# Altium footprint library FootPrintLib_9.PcbLib: 287 footprints (part 13 of 18)
Each footprint in its own frame and in the unit in brackets; x right, y up, seen from the top. Pads: shape width x height; smd on the part's side, far side on the other; paste and mask are expansions set on the pad; w line width, h text height; cw(c..) or ccw(c..) is an arc to the next point about the centre after c.
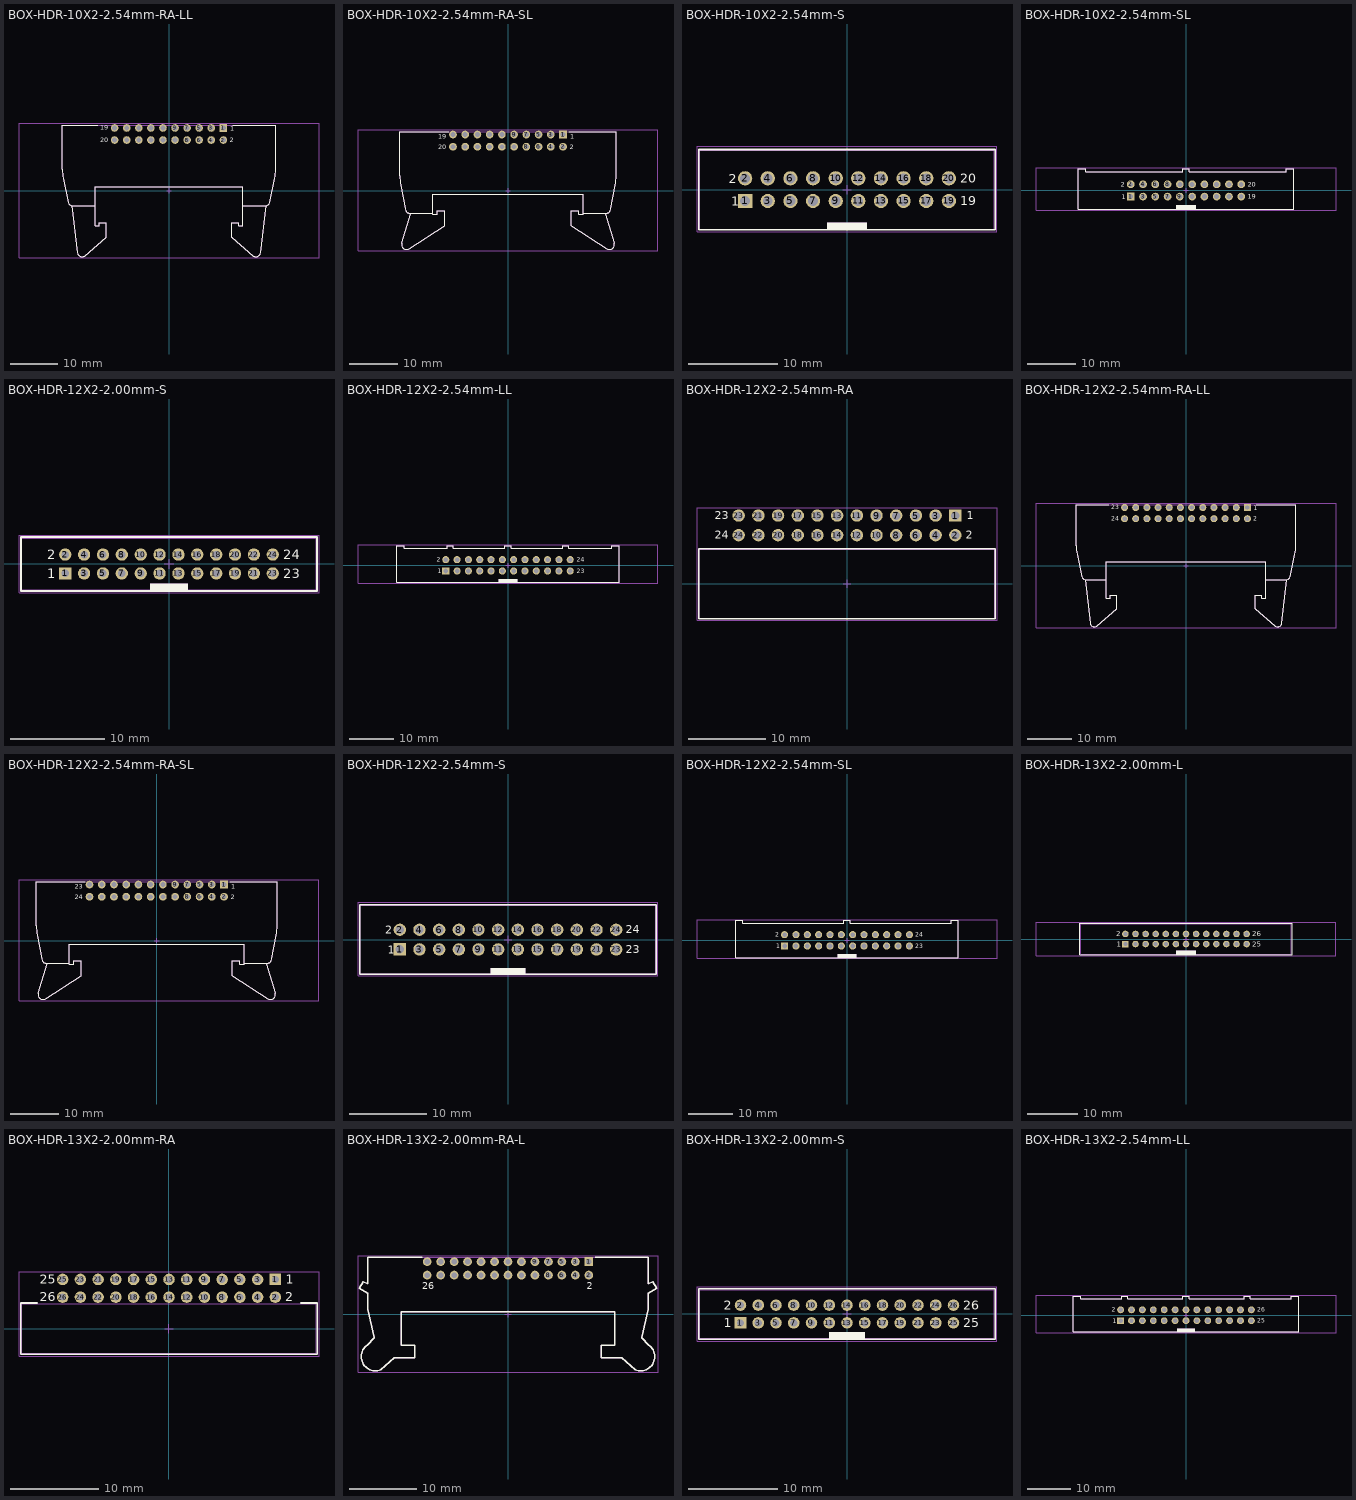
[diagram p12: the footprints below, top view; thin cyan lines are the x and y axes]

## BOX-HDR-10X2-2.54mm-RA-LL [mm] "20 pins, right angeled, long lever, gold plating"
height 10.8
pads (20):
  rect 1.6x1.6 hole 1.02: 1(11.43,13.23)
  round 1.6 hole 1.02: 2(11.43,10.69) 3(8.89,13.23) 4(8.89,10.69) 5(6.35,13.23) 6(6.35,10.69) 7(3.81,13.23) 8(3.81,10.69) 9(1.27,13.23) 10(1.27,10.69) 11(-1.27,13.23) 12(-1.27,10.69) 13(-3.81,13.23) 14(-3.81,10.69) 15(-6.35,13.23) 16(-6.35,10.69) 17(-8.89,13.23) 18(-8.89,10.69) 19(-11.43,13.23) 20(-11.43,10.69)
Top Overlay:
  lines w0.2: -22.45,4.54 -22.45,13.85 -15,13.85 ; -22.445,4.54 ccw(c-12.45,4.84) -22.204,2.636 -21.159,-2.534 ; -21.153,-2.533 ccw(c-20.23,-2.15) -20.23,-3.15 -15.55,-3.15 ; -20.414,-3.15 -19.268,-13.022 ccw(c-18.28,-12.87) -17.622,-13.623 -13.151,-9.758 ; -13.15,-9.76 -13.15,-6.66 -14.65,-6.66 -14.65,-7.37 -15.55,-7.37 -15.55,0.85 15.55,0.85 15.55,-7.37 14.65,-7.37 14.65,-6.66 13.15,-6.66 13.15,-9.76 ; 13.151,-9.758 17.623,-13.623 ccw(c18.28,-12.87) 19.268,-13.022 20.414,-3.15 ; 13.4,13.85 22.45,13.85 22.45,4.54 ; 15.55,-3.15 20.23,-3.15 ccw(c20.23,-2.15) 21.154,-2.533 ; 21.159,-2.534 22.204,2.636 ccw(c12.45,4.84) 22.446,4.54
  text "1" at 12.85,12.66 h1.02
  text "2" at 12.75,10.26 h1.02
  text "19" at -14.5,12.8 h1.02
  text "20" at -14.5,10.26 h1.02
Mechanical 13:
  lines w0.1: -22.45,4.54 -22.45,13.85 22.45,13.85 22.45,4.54 ; -22.445,4.54 ccw(c-12.45,4.84) -22.204,2.636 -21.159,-2.534 ; -21.153,-2.533 ccw(c-20.23,-2.15) -20.23,-3.15 -15.55,-3.15 ; -20.414,-3.15 -19.268,-13.022 ccw(c-18.28,-12.87) -17.622,-13.623 -13.151,-9.758 ; -13.15,-9.76 -13.15,-6.66 -14.65,-6.66 -14.65,-7.37 -15.55,-7.37 -15.55,0.85 15.55,0.85 15.55,-7.37 14.65,-7.37 14.65,-6.66 13.15,-6.66 13.15,-9.76 ; 13.151,-9.758 17.623,-13.623 ccw(c18.28,-12.87) 19.268,-13.022 20.414,-3.15 ; 15.55,-3.15 20.23,-3.15 ccw(c20.23,-2.15) 21.154,-2.533 ; 21.159,-2.534 22.204,2.636 ccw(c12.45,4.84) 22.446,4.54
Mechanical 15:
  lines w0.05: -0.5,0 0.5,0 ; 0,-0.5 0,0.5 ; -31.55,-14.06 -31.55,14.23 31.55,14.23 31.55,-14.06 -31.55,-14.06
3D body "61202022921 (rev1).stp": height 8.35, standoff -2.35, extent -22.45,-13.871 22.45,13.85

## BOX-HDR-10X2-2.54mm-RA-SL [mm] "20 pins, right angeled, short lever, gold plating"
height 8.3
pads (20):
  rect 1.6x1.6 hole 1.02: 1(11.43,11.63)
  round 1.6 hole 1.02: 2(11.43,9.09) 3(8.89,11.63) 4(8.89,9.09) 5(6.35,11.63) 6(6.35,9.09) 7(3.81,11.63) 8(3.81,9.09) 9(1.27,11.63) 10(1.27,9.09) 11(-1.27,11.63) 12(-1.27,9.09) 13(-3.81,11.63) 14(-3.81,9.09) 15(-6.35,11.63) 16(-6.35,9.09) 17(-8.89,11.63) 18(-8.89,9.09) 19(-11.43,11.63) 20(-11.43,9.09)
Top Overlay:
  lines w0.2: -21.314,-3.751 -22.256,1.138 cw(c-12.45,3.1) -22.45,3.1 -22.45,12.25 -12.35,12.25 ; -21.31,-3.75 ccw(c-20.31,-3.75) -20.31,-4.75 ; -20.405,-4.75 -15.65,-4.75 ; -20.224,-4.851 -22.057,-10.941 ccw(c-21.1,-11.23) -20.55,-12.066 -13.15,-7.33 -13.15,-4.23 -14.65,-4.23 -14.65,-4.94 -15.65,-4.94 -15.65,-0.75 15.65,-0.75 15.65,-4.94 14.65,-4.94 14.65,-4.23 13.15,-4.23 13.15,-7.33 20.55,-12.067 ccw(c21.1,-11.23) 22.057,-10.941 20.224,-4.851 ; 12.6,12.25 22.45,12.25 22.45,3.1 cw(c12.45,3.1) 22.256,1.138 21.314,-3.751 ; 15.65,-4.75 20.405,-4.75 ; 20.31,-4.75 ccw(c20.31,-3.75) 21.31,-3.75
  text "19" at -14.5,10.8 h1.02
  text "20" at -14.5,8.6 h1.02
  text "2" at 12.85,8.6 h1.02
  text "1" at 12.95,10.8 h1.02
Mechanical 13:
  lines w0.1: -21.314,-3.751 -22.256,1.138 cw(c-12.45,3.1) -22.45,3.1 -22.45,12.25 22.45,12.25 22.45,3.1 cw(c12.45,3.1) 22.256,1.138 21.314,-3.751 ; -21.31,-3.75 ccw(c-20.31,-3.75) -20.31,-4.75 ; -20.405,-4.75 -15.65,-4.75 ; -20.224,-4.851 -22.057,-10.941 ccw(c-21.1,-11.23) -20.55,-12.066 -13.15,-7.33 -13.15,-4.23 -14.65,-4.23 -14.65,-4.94 -15.65,-4.94 -15.65,-0.75 15.65,-0.75 15.65,-4.94 14.65,-4.94 14.65,-4.23 13.15,-4.23 13.15,-7.33 20.55,-12.067 ccw(c21.1,-11.23) 22.057,-10.941 20.224,-4.851 ; 15.65,-4.75 20.405,-4.75 ; 20.31,-4.75 ccw(c20.31,-3.75) 21.31,-3.75
Mechanical 15:
  lines w0.05: -0.5,0 0.5,0 ; 0,-0.5 0,0.5 ; -31.15,-12.45 31.15,-12.45 31.15,12.63 -31.15,12.63 -31.15,-12.45
3D body "61202022121.stp": height 8.35, standoff -3.35, extent -22.45,-12.25 22.45,12.25

## BOX-HDR-10X2-2.54mm-S [mm] "20 pins, straight, gold plating"
height 9.1
pads (20):
  rect 1.6x1.6 hole 1.1: 1(-11.43,-1.27)
  round 1.6 hole 1.1: 2(-11.43,1.27) 3(-8.89,-1.27) 4(-8.89,1.27) 5(-6.35,-1.27) 6(-6.35,1.27) 7(-3.81,-1.27) 8(-3.81,1.27) 9(-1.27,-1.27) 10(-1.27,1.27) 11(1.27,-1.27) 12(1.27,1.27) 13(3.81,-1.27) 14(3.81,1.27) 15(6.35,-1.27) 16(6.35,1.27) 17(8.89,-1.27) 18(8.89,1.27) 19(11.43,-1.27) 20(11.43,1.27)
Top Overlay:
  rectangle: -2.25,-4.5 2.25,-3.7
  lines w0.2: -16.63,-4.5 16.63,-4.5 16.63,4.5 -16.63,4.5 -16.63,-4.5
  text "19" at 12.69,-1.74 h1.02
  text "20" at 12.69,0.8 h1.02
  text "1" at -12.99,-1.8 h1.02
  text "2" at -13.29,0.74 h1.02
Mechanical 13:
  rectangle: -2.25,-4.425 2.25,-3.7
  lines w0.1: -16.53,-4.425 -16.53,4.425 16.53,4.425 16.53,-4.425 -16.53,-4.425
Mechanical 15:
  lines w0.05: -0.5,0 0.5,0 ; 0,-0.5 0,0.5 ; -16.83,-4.7 16.83,-4.7 16.83,4.85 -16.83,4.85 -16.83,-4.7
3D body "61202021621.stp": height 9.13, standoff -2.98, extent -16.53,-4.425 16.53,4.75

## BOX-HDR-10X2-2.54mm-SL [mm] "20 pins, straight, short lever, gold plating"
height 24.5
pads (20):
  rect 1.6x1.6 hole 1.02: 1(-11.43,-1.27)
  round 1.6 hole 1.02: 2(-11.43,1.27) 3(-8.89,-1.27) 4(-8.89,1.27) 5(-6.35,-1.27) 6(-6.35,1.27) 7(-3.81,-1.27) 8(-3.81,1.27) 9(-1.27,-1.27) 10(-1.27,1.27) 11(1.27,-1.27) 12(1.27,1.27) 13(3.81,-1.27) 14(3.81,1.27) 15(6.35,-1.27) 16(6.35,1.27) 17(8.89,-1.27) 18(8.89,1.27) 19(11.43,-1.27) 20(11.43,1.27)
Top Overlay:
  rectangle: -2.1,-3.85 2.1,-3.05
  lines w0.2: -0.7,4.45 0.7,4.45 0.7,3.85 20.8,3.85 20.8,4.45 22.35,4.45 22.35,-3.85 -22.35,-3.85 -22.35,4.45 -20.8,4.45 -20.8,3.85 -0.7,3.85 -0.7,4.45 ; -0.7,4.45 -0.7,4.45
  text "19" at 12.75,-1.74 h1.02
  text "20" at 12.75,0.8 h1.02
  text "2" at -13.55,0.8 h1.02
  text "1" at -13.25,-1.8 h1.02
Mechanical 13:
  rectangle: -2.1,-3.85 2.1,-3.05
  lines w0.1: -0.7,4.45 -0.7,3.85 -20.8,3.85 -20.8,4.45 -22.35,4.45 -22.35,-3.85 22.35,-3.85 22.35,4.45 20.8,4.45 20.8,3.85 0.7,3.85 0.7,4.45 -0.7,4.45 ; -0.7,4.45 -0.7,4.45
Mechanical 15:
  lines w0.05: -0.5,0 0.5,0 ; 0,-0.5 0,0.5 ; -31.05,-4.05 -31.05,4.65 31.05,4.65 31.05,-4.05 -31.05,-4.05
3D body "61202022021.stp": height 24.55, standoff -3.35, extent -22.449,-3.849 22.451,4.451

## BOX-HDR-12X2-2.00mm-S [mm] "2.00mm Male Box Header, 24p"
height 5.6
pads (24):
  rect 1.3x1.3 hole 0.8: 1(-11,-1)
  round 1.3 hole 0.8: 2(-11,1) 3(-9,-1) 4(-9,1) 5(-7,-1) 6(-7,1) 7(-5,-1) 8(-5,1) 9(-3,-1) 10(-3,1) 11(-1,-1) 12(-1,1) 13(1,-1) 14(1,1) 15(3,-1) 16(3,1) 17(5,-1) 18(5,1) 19(7,-1) 20(7,1) 21(9,-1) 22(9,1) 23(11,-1) 24(11,1)
Top Overlay:
  rectangle: -2,-2.85 2,-2.05
  lines w0.2: -15.7,-2.85 -15.7,2.85 15.7,2.85 15.7,-2.85 -15.7,-2.85
  text "23" at 12.1,-1.5 h1.02
  text "24" at 12.1,0.5 h1.02
  text "2" at -12.9,0.5 h1.02
  text "1" at -12.9,-1.5 h1.02
Mechanical 13:
  rectangle: -2,-2.75 2,-2.05
  lines w0.1: -15.6,-2.75 15.6,-2.75 15.6,2.75 -15.6,2.75 -15.6,-2.75
Mechanical 15:
  lines w0.05: -0.5,0 0.5,0 ; 0,-0.5 0,0.5 ; -15.9,-3.05 15.9,-3.05 15.9,3.05 -15.9,3.05 -15.9,-3.05
3D body "62502421621.stp": height 5.65, standoff -2.5, extent -15.6,-2.75 15.6,2.75

## BOX-HDR-12X2-2.54mm-LL [mm] "24 pins, straight, long lever, gold plating"
height 28
pads (24):
  rect 1.6x1.6 hole 1.02: 1(-13.97,-1.27)
  round 1.6 hole 1.02: 2(-13.97,1.27) 3(-11.43,-1.27) 4(-11.43,1.27) 5(-8.89,-1.27) 6(-8.89,1.27) 7(-6.35,-1.27) 8(-6.35,1.27) 9(-3.81,-1.27) 10(-3.81,1.27) 11(-1.27,-1.27) 12(-1.27,1.27) 13(1.27,-1.27) 14(1.27,1.27) 15(3.81,-1.27) 16(3.81,1.27) 17(6.35,-1.27) 18(6.35,1.27) 19(8.89,-1.27) 20(8.89,1.27) 21(11.43,-1.27) 22(11.43,1.27) 23(13.97,-1.27) 24(13.97,1.27)
Top Overlay:
  rectangle: -2.1,-3.85 2.1,-3.04
  lines w0.2: -24.99,-3.85 24.99,-3.85 24.99,4.45 23.26,4.45 23.26,3.85 13.69,3.85 13.69,4.45 12.29,4.45 12.29,3.85 0.7,3.85 0.7,4.45 -0.7,4.45 -0.7,3.85 -12.29,3.85 -12.29,4.45 -13.69,4.45 -13.69,3.85 -23.26,3.85 -23.26,4.45 -24.99,4.45 -24.99,-3.85
  text "24" at 15.39,0.8 h1.02
  text "23" at 15.39,-1.74 h1.02
  text "1" at -15.79,-1.8 h1.02
  text "2" at -15.99,0.8 h1.02
Mechanical 13:
  rectangle: -2.1,-3.85 2.1,-3.04
  lines w0.1: -24.99,-3.85 -24.99,4.45 -23.26,4.45 -23.26,3.85 -13.69,3.85 -13.69,4.45 -12.29,4.45 -12.29,3.85 -0.7,3.85 -0.7,4.45 0.7,4.45 0.7,3.85 12.29,3.85 12.29,4.45 13.69,4.45 13.69,3.85 23.26,3.85 23.26,4.45 24.99,4.45 24.99,-3.85 -24.99,-3.85
Mechanical 15:
  lines w0.05: -0.5,0 0.5,0 ; 0,-0.5 0,0.5 ; -33.69,-4.05 33.69,-4.05 33.69,4.65 -33.69,4.65 -33.69,-4.05
3D body "61202422821 (rev1).stp": height 27.84, standoff -3.35, extent -24.99,-3.86 24.99,4.45

## BOX-HDR-12X2-2.54mm-RA [mm] "24 pins, right angled, gold plating"
height 9.1
pads (24):
  rect 1.6x1.6 hole 1.1: 1(13.97,8.805)
  round 1.6 hole 1.1: 2(13.97,6.265) 3(11.43,8.805) 4(11.43,6.265) 5(8.89,8.805) 6(8.89,6.265) 7(6.35,8.805) 8(6.35,6.265) 9(3.81,8.805) 10(3.81,6.265) 11(1.27,8.805) 12(1.27,6.265) 13(-1.27,8.805) 14(-1.27,6.265) 15(-3.81,8.805) 16(-3.81,6.265) 17(-6.35,8.805) 18(-6.35,6.265) 19(-8.89,8.805) 20(-8.89,6.265) 21(-11.43,8.805) 22(-11.43,6.265) 23(-13.97,8.805) 24(-13.97,6.265)
Top Overlay:
  lines w0.2: -19.145,-4.5 -19.145,4.5 19.145,4.5 19.145,-4.5 -19.145,-4.5
  text "2" at 15.33,5.8 h1.02
  text "1" at 15.43,8.34 h1.02
  text "24" at -17.04,5.8 h1.02
  text "23" at -17.04,8.34 h1.02
Mechanical 13:
  lines w0.1: -19.07,-4.425 -19.07,4.425 19.07,4.425 19.07,-4.425 -19.07,-4.425
Mechanical 15:
  lines w0.05: -0.5,0 0.5,0 ; 0,-0.5 0,0.5 ; -19.345,-4.7 19.345,-4.7 19.345,9.805 -19.345,9.805 -19.345,-4.7
3D body "61202421721.stp": height 9.23, standoff -2.88, extent -19.07,-4.425 19.07,9.125

## BOX-HDR-12X2-2.54mm-RA-LL [mm] "24 pins, right angeled, long lever, gold plating"
height 10.8
pads (24):
  rect 1.6x1.6 hole 1.02: 1(13.97,13.23)
  round 1.6 hole 1.02: 2(13.97,10.69) 3(11.43,13.23) 4(11.43,10.69) 5(8.89,13.23) 6(8.89,10.69) 7(6.35,13.23) 8(6.35,10.69) 9(3.81,13.23) 10(3.81,10.69) 11(1.27,13.23) 12(1.27,10.69) 13(-1.27,13.23) 14(-1.27,10.69) 15(-3.81,13.23) 16(-3.81,10.69) 17(-6.35,13.23) 18(-6.35,10.69) 19(-8.89,13.23) 20(-8.89,10.69) 21(-11.43,13.23) 22(-11.43,10.69) 23(-13.97,13.23) 24(-13.97,10.69)
Top Overlay:
  lines w0.2: -24.99,4.54 -24.99,13.85 -17.54,13.85 ; -24.985,4.54 ccw(c-14.99,4.84) -24.744,2.636 -23.699,-2.534 ; -23.693,-2.533 ccw(c-22.77,-2.15) -22.77,-3.15 -18.09,-3.15 ; -22.954,-3.15 -21.808,-13.022 ccw(c-20.82,-12.87) -20.162,-13.623 -15.691,-9.758 ; -15.69,-9.76 -15.69,-6.66 -17.19,-6.66 -17.19,-7.37 -18.09,-7.37 -18.09,0.85 18.09,0.85 18.09,-7.37 17.19,-7.37 17.19,-6.66 15.69,-6.66 15.69,-9.76 ; 15.691,-9.758 20.163,-13.623 ccw(c20.82,-12.87) 21.808,-13.022 22.954,-3.15 ; 15.94,13.85 24.99,13.85 24.99,4.54 ; 18.09,-3.15 22.77,-3.15 ccw(c22.77,-2.15) 23.694,-2.533 ; 23.699,-2.534 24.744,2.636 ccw(c14.99,4.84) 24.986,4.54
  text "23" at -17.04,12.8 h1.02
  text "24" at -17.04,10.26 h1.02
  text "2" at 15.29,10.26 h1.02
  text "1" at 15.39,12.66 h1.02
Mechanical 13:
  lines w0.1: -24.99,4.54 -24.99,13.85 24.99,13.85 24.99,4.54 ; -24.985,4.54 ccw(c-14.99,4.84) -24.744,2.636 -23.699,-2.534 ; -23.693,-2.533 ccw(c-22.77,-2.15) -22.77,-3.15 -18.09,-3.15 ; -22.954,-3.15 -21.808,-13.022 ccw(c-20.82,-12.87) -20.162,-13.623 -15.691,-9.758 ; -15.69,-9.76 -15.69,-6.66 -17.19,-6.66 -17.19,-7.37 -18.09,-7.37 -18.09,0.85 18.09,0.85 18.09,-7.37 17.19,-7.37 17.19,-6.66 15.69,-6.66 15.69,-9.76 ; 15.691,-9.758 20.163,-13.623 ccw(c20.82,-12.87) 21.808,-13.022 22.954,-3.15 ; 18.09,-3.15 22.77,-3.15 ccw(c22.77,-2.15) 23.694,-2.533 ; 23.699,-2.534 24.744,2.636 ccw(c14.99,4.84) 24.986,4.54
Mechanical 15:
  lines w0.05: -0.5,0 0.5,0 ; 0,-0.5 0,0.5 ; -34.09,-14.06 34.09,-14.06 34.09,14.23 -34.09,14.23 -34.09,-14.06
3D body "61202422921 (rev1).stp": height 8.35, standoff -2.35, extent -24.99,-13.871 24.99,13.85

## BOX-HDR-12X2-2.54mm-RA-SL [mm] "24 pins, right angeled, short lever, gold plating"
height 8.3
pads (24):
  rect 1.6x1.6 hole 1.02: 1(13.97,11.63)
  round 1.6 hole 1.02: 2(13.97,9.09) 3(11.43,11.63) 4(11.43,9.09) 5(8.89,11.63) 6(8.89,9.09) 7(6.35,11.63) 8(6.35,9.09) 9(3.81,11.63) 10(3.81,9.09) 11(1.27,11.63) 12(1.27,9.09) 13(-1.27,11.63) 14(-1.27,9.09) 15(-3.81,11.63) 16(-3.81,9.09) 17(-6.35,11.63) 18(-6.35,9.09) 19(-8.89,11.63) 20(-8.89,9.09) 21(-11.43,11.63) 22(-11.43,9.09) 23(-13.97,11.63) 24(-13.97,9.09)
Top Overlay:
  lines w0.2: -23.854,-3.751 -24.796,1.138 cw(c-14.99,3.1) -24.99,3.1 -24.99,12.25 -14.89,12.25 ; -23.85,-3.75 ccw(c-22.85,-3.75) -22.85,-4.75 ; -22.945,-4.75 -18.19,-4.75 ; -22.764,-4.851 -24.597,-10.941 ccw(c-23.64,-11.23) -23.09,-12.066 -15.69,-7.33 -15.69,-4.23 -17.19,-4.23 -17.19,-4.94 -18.19,-4.94 -18.19,-0.75 18.19,-0.75 18.19,-4.94 17.19,-4.94 17.19,-4.23 15.69,-4.23 15.69,-7.33 23.09,-12.067 ccw(c23.64,-11.23) 24.597,-10.941 22.764,-4.851 ; 15.14,12.25 24.99,12.25 24.99,3.1 cw(c14.99,3.1) 24.796,1.138 23.854,-3.751 ; 18.19,-4.75 22.945,-4.75 ; 22.85,-4.75 ccw(c22.85,-3.75) 23.85,-3.75
  text "24" at -17.04,8.6 h1.02
  text "23" at -17.04,10.8 h1.02
  text "2" at 15.39,8.6 h1.02
  text "1" at 15.49,10.8 h1.02
Mechanical 13:
  lines w0.1: -23.854,-3.751 -24.796,1.138 cw(c-14.99,3.1) -24.99,3.1 -24.99,12.25 24.99,12.25 24.99,3.1 cw(c14.99,3.1) 24.796,1.138 23.854,-3.751 ; -23.85,-3.75 ccw(c-22.85,-3.75) -22.85,-4.75 ; -22.945,-4.75 -18.19,-4.75 ; -22.764,-4.851 -24.597,-10.941 ccw(c-23.64,-11.23) -23.09,-12.066 -15.69,-7.33 -15.69,-4.23 -17.19,-4.23 -17.19,-4.94 -18.19,-4.94 -18.19,-0.75 18.19,-0.75 18.19,-4.94 17.19,-4.94 17.19,-4.23 15.69,-4.23 15.69,-7.33 23.09,-12.067 ccw(c23.64,-11.23) 24.597,-10.941 22.764,-4.851 ; 18.19,-4.75 22.945,-4.75 ; 22.85,-4.75 ccw(c22.85,-3.75) 23.85,-3.75
Mechanical 15:
  lines w0.05: -0.5,0 0.5,0 ; 0,-0.5 0,0.5 ; -28.61,-12.45 33.69,-12.45 33.69,12.63 -28.61,12.63 -28.61,-12.45
3D body "61202422121.stp": height 8.35, standoff -3.35, extent -24.99,-12.25 24.99,12.25

## BOX-HDR-12X2-2.54mm-S [mm] "24 pins, straight, gold plating"
height 9.1
pads (24):
  rect 1.6x1.6 hole 1.1: 1(-13.97,-1.27)
  round 1.6 hole 1.1: 2(-13.97,1.27) 3(-11.43,-1.27) 4(-11.43,1.27) 5(-8.89,-1.27) 6(-8.89,1.27) 7(-6.35,-1.27) 8(-6.35,1.27) 9(-3.81,-1.27) 10(-3.81,1.27) 11(-1.27,-1.27) 12(-1.27,1.27) 13(1.27,-1.27) 14(1.27,1.27) 15(3.81,-1.27) 16(3.81,1.27) 17(6.35,-1.27) 18(6.35,1.27) 19(8.89,-1.27) 20(8.89,1.27) 21(11.43,-1.27) 22(11.43,1.27) 23(13.97,-1.27) 24(13.97,1.27)
Top Overlay:
  rectangle: -2.25,-4.5 2.25,-3.7
  lines w0.2: -19.17,-4.5 -19.17,4.5 19.17,4.5 19.17,-4.5 -19.17,-4.5
  text "2" at -15.83,0.74 h1.02
  text "1" at -15.53,-1.8 h1.02
  text "23" at 15.23,-1.74 h1.02
  text "24" at 15.23,0.8 h1.02
Mechanical 13:
  rectangle: -2.25,-4.425 2.25,-3.7
  lines w0.1: -19.07,-4.425 19.07,-4.425 19.07,4.425 -19.07,4.425 -19.07,-4.425
Mechanical 15:
  lines w0.05: -0.5,0 0.5,0 ; 0,-0.5 0,0.5 ; -19.37,-4.7 -19.37,4.85 19.37,4.85 19.37,-4.7 -19.37,-4.7
3D body "61202421621.stp": height 9.13, standoff -2.98, extent -19.07,-4.425 19.07,4.75

## BOX-HDR-12X2-2.54mm-SL [mm] "24 pins, straight, short lever, gold plating"
height 24.5
pads (24):
  rect 1.6x1.6 hole 1.02: 1(-13.97,-1.27)
  round 1.6 hole 1.02: 2(-13.97,1.27) 3(-11.43,-1.27) 4(-11.43,1.27) 5(-8.89,-1.27) 6(-8.89,1.27) 7(-6.35,-1.27) 8(-6.35,1.27) 9(-3.81,-1.27) 10(-3.81,1.27) 11(-1.27,-1.27) 12(-1.27,1.27) 13(1.27,-1.27) 14(1.27,1.27) 15(3.81,-1.27) 16(3.81,1.27) 17(6.35,-1.27) 18(6.35,1.27) 19(8.89,-1.27) 20(8.89,1.27) 21(11.43,-1.27) 22(11.43,1.27) 23(13.97,-1.27) 24(13.97,1.27)
Top Overlay:
  rectangle: -2.1,-3.85 2.1,-3.05
  lines w0.2: -0.7,4.45 0.7,4.45 0.7,3.85 23.34,3.85 23.34,4.45 24.89,4.45 24.89,-3.85 -24.89,-3.85 -24.89,4.45 -23.34,4.45 -23.34,3.85 -0.7,3.85 -0.7,4.45 ; -0.7,4.45 -0.7,4.45
  text "2" at -16.09,0.8 h1.02
  text "1" at -15.79,-1.8 h1.02
  text "24" at 15.29,0.8 h1.02
  text "23" at 15.29,-1.74 h1.02
Mechanical 13:
  rectangle: -2.1,-3.85 2.1,-3.05
  lines w0.1: -0.7,4.45 -0.7,3.85 -23.34,3.85 -23.34,4.45 -24.89,4.45 -24.89,-3.85 24.89,-3.85 24.89,4.45 23.34,4.45 23.34,3.85 0.7,3.85 0.7,4.45 -0.7,4.45 ; -0.7,4.45 -0.7,4.45
Mechanical 15:
  lines w0.05: -0.5,0 0.5,0 ; 0,-0.5 0,0.5 ; -33.59,-4.05 -33.59,4.65 33.59,4.65 33.59,-4.05 -33.59,-4.05
3D body "61202422021.stp": height 24.55, standoff -3.35, extent -24.989,-3.849 24.991,4.451

## BOX-HDR-13X2-2.00mm-L [mm] "2.00mm Male Box Header with Lever, 26p"
height 16.85
pads (26):
  rect 1.3x1.3 hole 0.8: 1(-12,-1)
  round 1.3 hole 0.8: 2(-12,1) 3(-10,-1) 4(-10,1) 5(-8,-1) 6(-8,1) 7(-6,-1) 8(-6,1) 9(-4,-1) 10(-4,1) 11(-2,-1) 12(-2,1) 13(0,-1) 14(0,1) 15(2,-1) 16(2,1) 17(4,-1) 18(4,1) 19(6,-1) 20(6,1) 21(8,-1) 22(8,1) 23(10,-1) 24(10,1) 25(12,-1) 26(12,1)
Top Overlay:
  rectangle: -2,-3.1 2,-2.3
  lines w0.2: -21,-3.1 -21,3.1 21,3.1 21,-3.1 -21,-3.1
  text "1" at -13.7,-1.5 h1.02
  text "2" at -13.8,0.5 h1.02
  text "26" at 13.1,0.5 h1.02
  text "25" at 13.1,-1.5 h1.02
Mechanical 13:
  rectangle: -2,-3 2,-2.3
  lines w0.1: -20.85,-3 -20.85,3 20.85,3 20.85,-3 -20.85,-3
Mechanical 15:
  lines w0.05: -0.5,0 0.5,0 ; 0,-0.5 0,0.5 ; -29.7,-3.3 29.7,-3.3 29.7,3.3 -29.7,3.3 -29.7,-3.3
3D body "62502622021.stp": height 16.9, standoff -2.95, extent -22.062,-3 22.063,3

## BOX-HDR-13X2-2.00mm-RA [mm] "2.00mm Male Angled Box Header, 26p"
height 5.4
pads (26):
  rect 1.3x1.3 hole 0.8: 1(12,5.55)
  round 1.3 hole 0.8: 2(12,3.55) 3(10,5.55) 4(10,3.55) 5(8,5.55) 6(8,3.55) 7(6,5.55) 8(6,3.55) 9(4,5.55) 10(4,3.55) 11(2,5.55) 12(2,3.55) 13(0,5.55) 14(0,3.55) 15(-2,5.55) 16(-2,3.55) 17(-4,5.55) 18(-4,3.55) 19(-6,5.55) 20(-6,3.55) 21(-8,5.55) 22(-8,3.55) 23(-10,5.55) 24(-10,3.55) 25(-12,5.55) 26(-12,3.55)
Top Overlay:
  lines w0.2: -14.875,2.9 -16.725,2.9 -16.725,-2.9 16.725,-2.9 16.725,2.9 14.875,2.9
  text "1" at 13.2,5.075 h1.02
  text "2" at 13.1,3.075 h1.02
  text "25" at -14.6,5.075 h1.02
  text "26" at -14.6,3.075 h1.02
Mechanical 13:
  lines w0.1: -16.6,-2.8 -16.6,2.8 16.6,2.8 16.6,-2.8 -16.6,-2.8
Mechanical 15:
  lines w0.05: -0.5,0 0.5,0 ; 0,-0.5 0,0.5 ; -16.925,-3.1 -16.925,6.4 16.925,6.4 16.925,-3.1 -16.925,-3.1
3D body "62502621721 (rev1).stp": height 5.5, standoff -2.85, extent -16.6,-2.8 16.6,5.8

## BOX-HDR-13X2-2.00mm-RA-L [mm] "2.00mm Male Angled Box Header with Lever, 26p"
height 3.15
pads (26):
  rect 1.3x1.3 hole 0.8: 1(12,7.775)
  round 1.3 hole 0.8: 2(12,5.775) 3(10,7.775) 4(10,5.775) 5(8,7.775) 6(8,5.775) 7(6,7.775) 8(6,5.775) 9(4,7.775) 10(4,5.775) 11(2,7.775) 12(2,5.775) 13(0,7.775) 14(0,5.775) 15(-2,7.775) 16(-2,5.775) 17(-4,7.775) 18(-4,5.775) 19(-6,7.775) 20(-6,5.775) 21(-8,7.775) 22(-8,5.775) 23(-10,7.775) 24(-10,5.775) 25(-12,7.775) 26(-12,5.775)
Top Overlay:
  lines w0.2: -21.466,4.813 -22.06,3.785 -20.851,3.087 -20.851,0.753 ; -21.46,4.815 -20.848,4.462 ; -20.894,-4.611 ccw(c-19.68,-6.325) -18.865,-8.26 ; -20.892,-4.613 -19.85,-3.535 -20.837,0.738 ; -20.85,4.464 -20.85,8.425 -12.75,8.425 ; -18.866,-8.259 -16.85,-6.475 -13.85,-6.475 -13.85,-4.675 -15.85,-4.675 -15.85,0.325 15.85,0.325 15.85,-4.675 13.85,-4.675 13.85,-6.475 16.85,-6.475 18.866,-8.259 ; 12.95,8.425 20.85,8.425 20.85,4.464 ; 18.865,-8.26 ccw(c19.68,-6.325) 20.894,-4.611 ; 20.837,0.738 19.85,-3.535 20.892,-4.613 ; 20.848,4.462 21.46,4.815 ; 20.851,0.753 20.851,3.087 22.06,3.785 21.466,4.813
  text "2" at 11.7,3.675 h1.02
  text "26" at -12.7,3.675 h1.02
Mechanical 13:
  lines w0.1: -21.466,4.813 -22.06,3.785 -20.851,3.087 -20.851,0.753 ; -21.46,4.815 -20.848,4.462 ; -20.894,-4.611 ccw(c-19.68,-6.325) -18.865,-8.26 ; -20.892,-4.613 -19.85,-3.535 -20.837,0.738 ; -20.85,4.464 -20.85,8.425 20.85,8.425 ; -18.866,-8.259 -16.85,-6.475 -13.85,-6.475 -13.85,-4.675 -15.85,-4.675 -15.85,0.325 15.85,0.325 15.85,-4.675 13.85,-4.675 13.85,-6.475 16.85,-6.475 18.866,-8.259 ; 18.865,-8.26 ccw(c19.68,-6.325) 20.894,-4.611 ; 20.837,0.738 19.85,-3.535 20.892,-4.613 ; 20.848,4.462 21.46,4.815 ; 20.848,8.423 20.85,8.425 ; 20.85,4.464 20.85,8.425 ; 20.851,0.753 20.851,3.087 22.06,3.785 21.466,4.813
Mechanical 15:
  lines w0.05: -0.5,0 0.5,0 ; 0,-0.5 0,0.5 ; -22.262,-8.625 22.262,-8.625 22.262,8.625 -22.262,8.625 -22.262,-8.625
3D body "62502622121.stp": height 6.1, standoff -3.05, extent -22.062,-8.425 22.062,8.425

## BOX-HDR-13X2-2.00mm-S [mm] "2.00mm Male Box Header, 26p"
height 5.6
pads (26):
  rect 1.3x1.3 hole 0.8: 1(-12,-1)
  round 1.3 hole 0.8: 2(-12,1) 3(-10,-1) 4(-10,1) 5(-8,-1) 6(-8,1) 7(-6,-1) 8(-6,1) 9(-4,-1) 10(-4,1) 11(-2,-1) 12(-2,1) 13(0,-1) 14(0,1) 15(2,-1) 16(2,1) 17(4,-1) 18(4,1) 19(6,-1) 20(6,1) 21(8,-1) 22(8,1) 23(10,-1) 24(10,1) 25(12,-1) 26(12,1)
Top Overlay:
  rectangle: -2,-2.85 2,-2.05
  lines w0.2: -16.7,-2.85 -16.7,2.85 16.7,2.85 16.7,-2.85 -16.7,-2.85
  text "26" at 13.1,0.5 h1.02
  text "25" at 13.1,-1.5 h1.02
  text "2" at -13.9,0.5 h1.02
  text "1" at -13.9,-1.5 h1.02
Mechanical 13:
  rectangle: -2,-2.75 2,-2.05
  lines w0.1: -16.6,-2.75 16.6,-2.75 16.6,2.75 -16.6,2.75 -16.6,-2.75
Mechanical 15:
  lines w0.05: -0.5,0 0.5,0 ; 0,-0.5 0,0.5 ; -16.9,-3.05 16.9,-3.05 16.9,3.05 -16.9,3.05 -16.9,-3.05
3D body "62502621621.stp": height 5.65, standoff -2.5, extent -16.6,-2.75 16.6,2.75

## BOX-HDR-13X2-2.54mm-LL [mm] "26 pins, straight, long lever, gold plating"
height 28
pads (26):
  rect 1.6x1.6 hole 1.02: 1(-15.24,-1.27)
  round 1.6 hole 1.02: 2(-15.24,1.27) 3(-12.7,-1.27) 4(-12.7,1.27) 5(-10.16,-1.27) 6(-10.16,1.27) 7(-7.62,-1.27) 8(-7.62,1.27) 9(-5.08,-1.27) 10(-5.08,1.27) 11(-2.54,-1.27) 12(-2.54,1.27) 13(0,-1.27) 14(0,1.27) 15(2.54,-1.27) 16(2.54,1.27) 17(5.08,-1.27) 18(5.08,1.27) 19(7.62,-1.27) 20(7.62,1.27) 21(10.16,-1.27) 22(10.16,1.27) 23(12.7,-1.27) 24(12.7,1.27) 25(15.24,-1.27) 26(15.24,1.27)
Top Overlay:
  rectangle: -2.1,-3.85 2.1,-3.04
  lines w0.2: -26.26,-3.85 26.26,-3.85 26.26,4.45 24.53,4.45 24.53,3.85 14.96,3.85 14.96,4.45 13.56,4.45 13.56,3.85 0.7,3.85 0.7,4.45 -0.7,4.45 -0.7,3.85 -13.56,3.85 -13.56,4.45 -14.96,4.45 -14.96,3.85 -24.53,3.85 -24.53,4.45 -26.26,4.45 -26.26,-3.85
  text "2" at -17.26,0.8 h1.02
  text "1" at -17.06,-1.8 h1.02
  text "26" at 16.66,0.8 h1.02
  text "25" at 16.66,-1.74 h1.02
Mechanical 13:
  rectangle: -2.1,-3.85 2.1,-3.04
  lines w0.1: -26.26,-3.85 -26.26,4.45 -24.53,4.45 -24.53,3.85 -14.96,3.85 -14.96,4.45 -13.56,4.45 -13.56,3.85 -0.7,3.85 -0.7,4.45 0.7,4.45 0.7,3.85 13.56,3.85 13.56,4.45 14.96,4.45 14.96,3.85 24.53,3.85 24.53,4.45 26.26,4.45 26.26,-3.85 -26.26,-3.85
Mechanical 15:
  lines w0.05: -0.5,0 0.5,0 ; 0,-0.5 0,0.5 ; -34.96,-4.05 -34.96,4.65 34.96,4.65 34.96,-4.05 -34.96,-4.05
3D body "61202622821 (rev1).stp": height 27.84, standoff -3.35, extent -26.26,-3.86 26.26,4.45